# Altium footprint library A3000_PSU.PcbLib: 3 footprints
Each footprint in its own frame and in the unit in brackets; x right, y up, seen from the top. Pads: shape width x height; smd on the part's side, far side on the other; paste and mask are expansions set on the pad; w line width, h text height; cw(c..) or ccw(c..) is an arc to the next point about the centre after c.
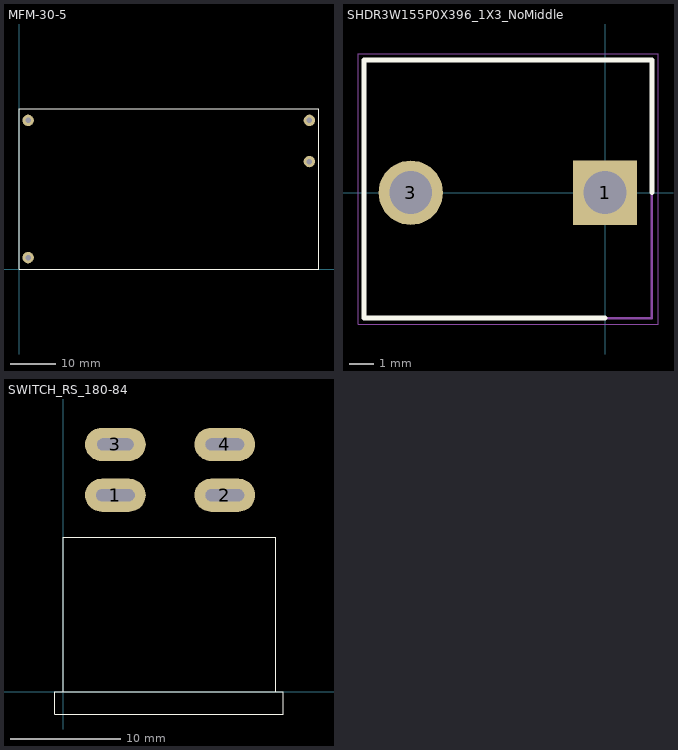
[diagram p0: the footprints below, top view; thin cyan lines are the x and y axes]

## MFM-30-5 [mm]
pads (4):
  round 2.5 hole 1.2: ACL(2,32.5) ACN(2,2.5) GND(63.5,23.5) VDC(63.5,32.5)
Top Overlay:
  lines w0.1: 0,0 0,35 65.6,35 65.6,0 0,0

## SHDR3W155P0X396_1X3_NoMiddle [mm]
pads (2):
  rect 2.625x2.625 hole 1.75: 1(0,0)
  round 2.625 hole 1.75: 3(-7.92,0)
Top Overlay:
  lines w0.2: 0,-5.11 -9.82,-5.11 -9.82,5.41 1.91,5.41 1.91,0
Mechanical 13:
  lines w0.1: -9.82,-5.11 1.91,-5.11 1.91,5.41 -9.82,5.41 -9.82,-5.11
Mechanical 15:
  lines w0.05: -10.07,-5.36 2.16,-5.36 2.16,5.66 -10.07,5.66 -10.07,-5.36
3D body "26-60-4030.stp": height 14.7, standoff -3.59, extent -9.817,-5.113 1.917,4.894

## SWITCH_RS_180-84 [mm]
pads (4):
  oval 5.5x3 hole 1.1 slot 3.5 at 0 deg: 1(4.7,17.8) 2(14.6,17.8) 4(14.6,22.4)
  oval 5.5x3 hole 1.1 slot 3.3 at 0 deg: 3(4.7,22.4)
Top Overlay:
  lines w0.1: -0.8,-2 19.9,-2 19.9,0 -0.8,0 -0.8,-2 ; 0,0 19.2,0 19.2,14 0,14 0,0